# EAGLE library part SQ1912EH-T1_GE3 (library SQ1912EH-T1_GE3)
MOSFET 20V Vds 0.8A Id AEC-Q101 Qualified Source: Datasheet <https://www.vishay.com/doc?67394>
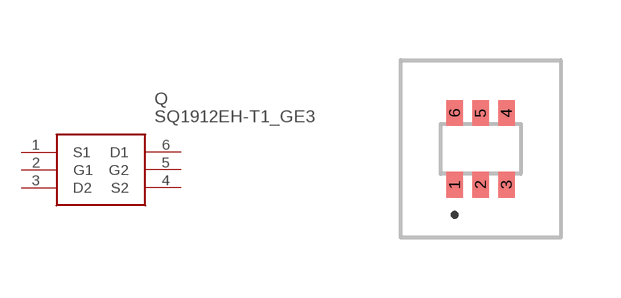
[diagram p0: symbol with the pads of SQ1912EHT1_GE3; footprint SQ1912EHT1_GE3]

Designator prefix Q

## SQ1912EH-T1_GE3 (Description: MOSFET 20V Vds 0.8A Id AEC-Q101 Qualified; Height: 1.1mm; Manufacturer_Name: Vishay; Manufacturer_Part_Number: SQ1912EH-T1_GE3; Mouser_Part_Number: 78-SQ1912EH-T1_GE3; Mouser_Price-Stock: https://www.mouser.co.uk/ProductDetail/Vishay-Siliconix/SQ1912EH-T1_GE3?qs=4pzlT8jjbhflabtcF6PTMA%3D%3D)  [SQ1912EHT1_GE3]
1  S1
2  G1
3  D2
4  S2
5  G2
6  D1

## Footprint SQ1912EHT1_GE3 (pad centres in mm)
SOT-363_(SC-70)
smd 0.406 x 0.648: 1 -0.648,-0.895; 2 0,-0.895; 3 0.648,-0.895; 4 0.648,0.895; 5 0,0.895; 6 -0.648,0.895